# Altium footprint library FUSC7451X160N.PcbLib: 1 footprints
Each footprint in its own frame and in the unit in brackets; x right, y up, seen from the top. Pads: shape width x height; smd on the part's side, far side on the other; paste and mask are expansions set on the pad; w line width, h text height; cw(c..) or ccw(c..) is an arc to the next point about the centre after c.
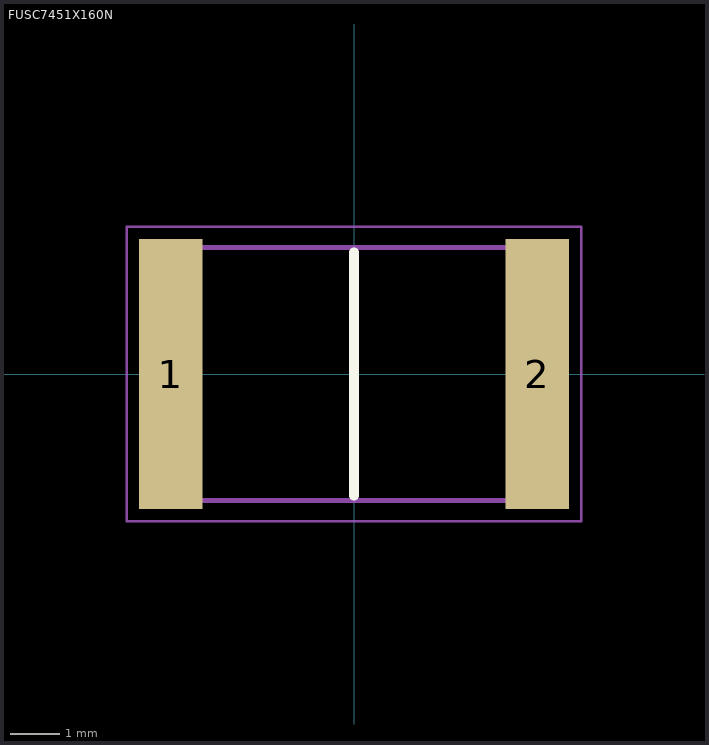
[diagram p0: the footprint, top view; thin cyan lines are the x and y axes]

## FUSC7451X160N [mm]
pads (2):
  rect 1.28x5.45 smd: 1(-3.705,0) 2(3.705,0)
Top Overlay:
  lines w0.2: 0,-2.46 0,2.46
Mechanical 15:
  lines w0.1: -3.678,-2.56 3.678,-2.56 3.678,2.56 -3.678,2.56 -3.678,-2.56
Mechanical 20:
  lines w0.05: -4.595,-2.975 4.595,-2.975 4.595,2.975 -4.595,2.975 -4.595,-2.975